# Altium footprint library FootPrintLib_11.PcbLib: 376 footprints (part 3 of 24)
Each footprint in its own frame and in the unit in brackets; x right, y up, seen from the top. Pads: shape width x height; smd on the part's side, far side on the other; paste and mask are expansions set on the pad; w line width, h text height; cw(c..) or ccw(c..) is an arc to the next point about the centre after c.
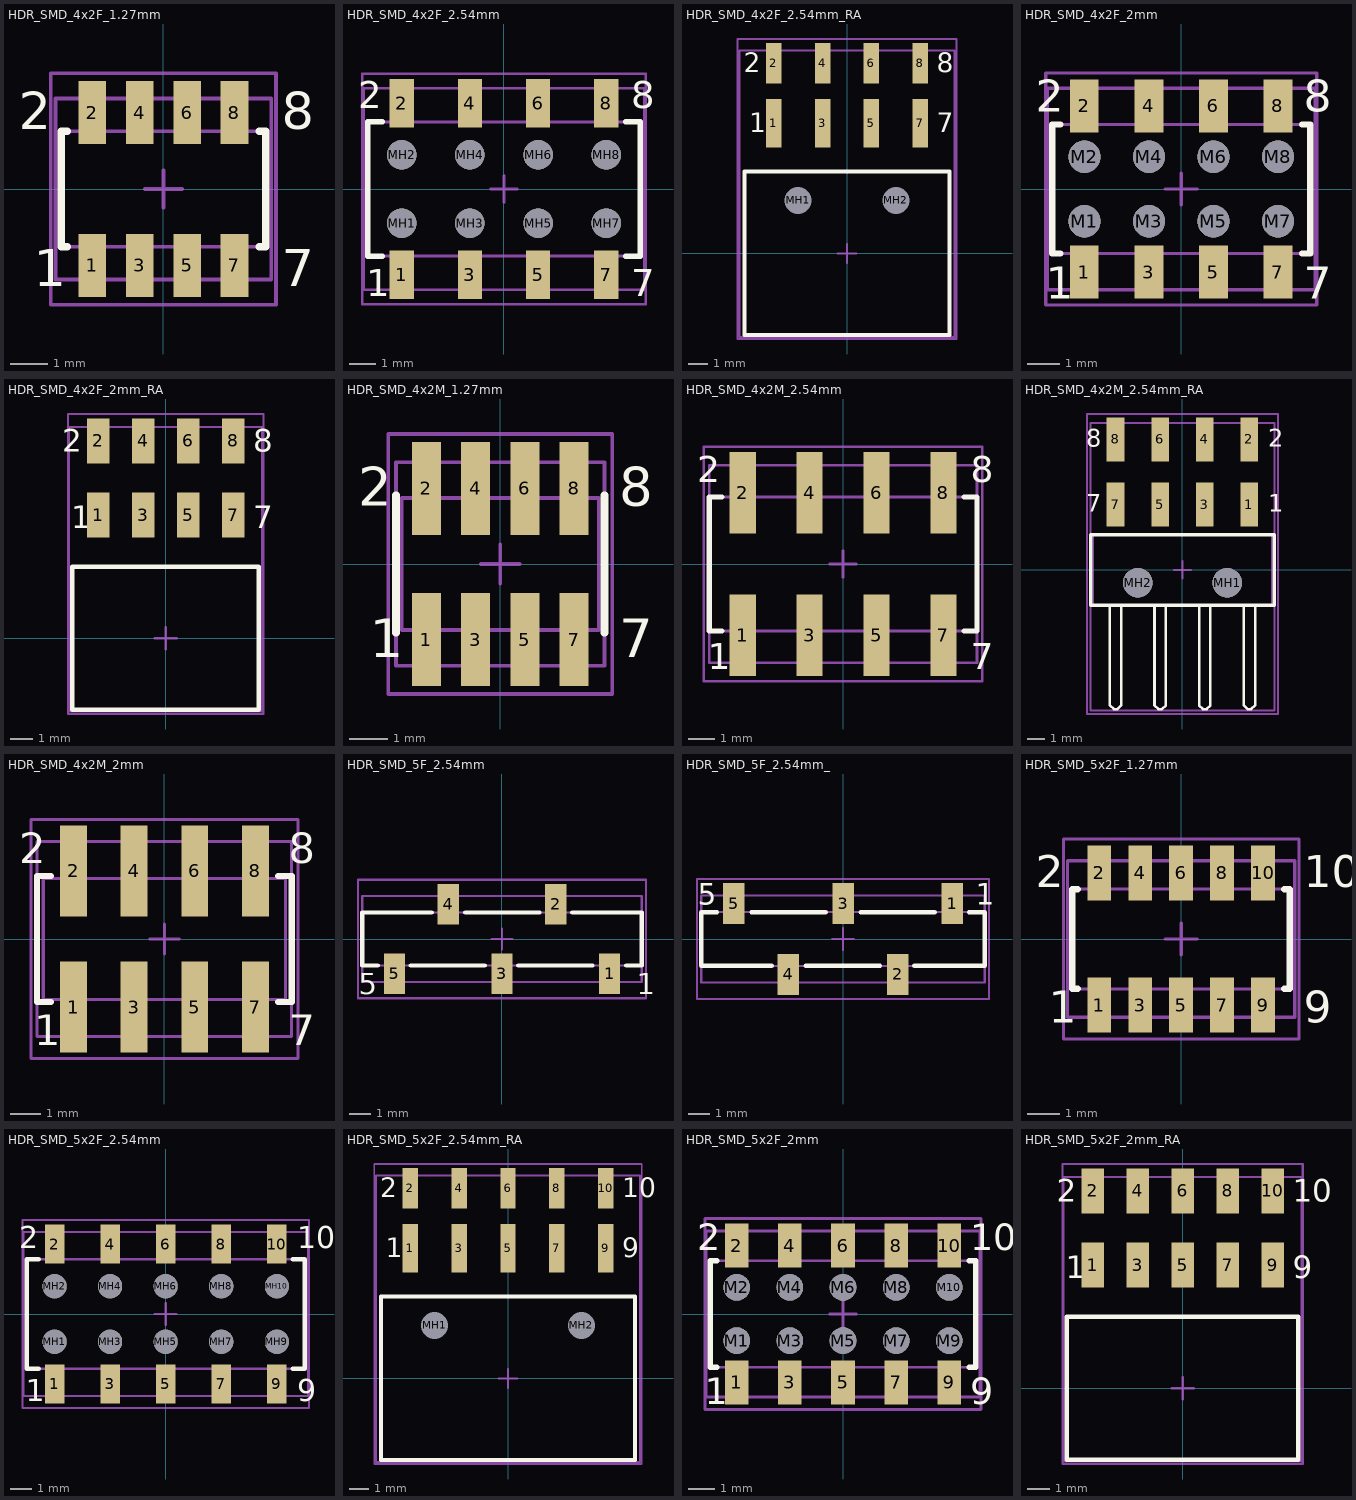
[diagram p2: the footprints below, top view; thin cyan lines are the x and y axes]

## HDR_SMD_4x2F_1.27mm [mm] "Socket Header, Pitch 1.27 mm, SMT, Vertical, dual row, 8p"
height 4.7
pads (8):
  rect 0.74x1.7 smd: 1(-1.905,-2.05) 2(-1.905,2.05) 3(-0.635,-2.05) 4(-0.635,2.05) 5(0.635,-2.05) 6(0.635,2.05) 7(1.905,-2.05) 8(1.905,2.05)
Top Overlay:
  lines w0.2: -2.57,-1.55 -2.74,-1.55 -2.74,1.55 -2.57,1.55 ; 2.57,-1.55 2.74,-1.55 2.74,1.55 2.57,1.55
  text "8" at 3.17,1.6 h1
  text "7" at 3.17,-2.6 h1
  text "2" at -3.87,1.6 h1
  text "1" at -3.47,-2.6 h1
Mechanical 11:
  lines w0.1: -2.74,-1.55 -2.74,1.55 2.74,1.55 2.74,-1.55 -2.74,-1.55
Mechanical 13:
  lines w0.1: -2.89,-2.425 2.89,-2.425 2.89,2.425 -2.89,2.425 -2.89,-2.425
Mechanical 15:
  lines w0.1: -0.5,0 0.5,0 ; 0,-0.5 0,0.5 ; -3.02,-3.1 3.02,-3.1 3.02,3.1 -3.02,3.1 -3.02,-3.1
3D body "62300821021.stp": height 4.6, standoff 0, extent -2.74,-2.299 2.74,2.299

## HDR_SMD_4x2F_2.54mm [mm] "Socket Header, Pitch 2.54 mm, SMT, Vertical, dual row, 8p"
height 3.7
pads (16):
  rect 0.9x1.8 smd: 1(-3.81,-3.2) 2(-3.81,3.2) 3(-1.27,-3.2) 4(-1.27,3.2) 5(1.27,-3.2) 6(1.27,3.2) 7(3.81,-3.2) 8(3.81,3.2)
  round 1.1 hole 1.1 unplated: MH1(-3.81,-1.27) MH2(-3.81,1.27) MH3(-1.27,-1.27) MH4(-1.27,1.27) MH5(1.27,-1.27) MH6(1.27,1.27) MH7(3.81,-1.27) MH8(3.81,1.27)
Top Overlay:
  lines w0.2: -4.54,-2.5 -5.08,-2.5 -5.08,2.5 -4.54,2.5 ; 4.54,-2.5 5.08,-2.5 5.08,2.5 4.54,2.5
  text "7" at 4.74,-4 h1
  text "8" at 4.74,3 h1
  text "2" at -5.44,3 h1
  text "1" at -5.14,-4 h1
Mechanical 11:
  lines w0.1: -5.08,-2.5 5.08,-2.5 5.08,2.5 -5.08,2.5 -5.08,-2.5
Mechanical 13:
  lines w0.1: -5.23,-3.75 5.23,-3.75 5.23,3.75 -5.23,3.75 -5.23,-3.75
Mechanical 15:
  lines w0.1: -0.5,0 0.5,0 ; 0,-0.5 0,0.5 ; -5.28,-4.3 5.28,-4.3 5.28,4.3 -5.28,4.3 -5.28,-4.3
3D body "610008243021.stp": height 3.7, standoff 0, extent -5.08,-3.603 5.08,3.603

## HDR_SMD_4x2F_2.54mm_RA [mm] "Socket Header, Pitch 2.54 mm, SMT, Angled, dual row, 8p"
height 5.2
pads (10):
  rect 0.8x2.5 smd: 1(-3.81,6.76) 3(-1.27,6.76) 5(1.27,6.76) 7(3.81,6.76)
  rect 0.8x2.1 smd: 2(-3.81,9.89) 4(-1.27,9.89) 6(1.27,9.89) 8(3.81,9.89)
  round 1.3 hole 1.4 unplated: MH1(-2.54,2.75) MH2(2.54,2.75)
Top Overlay:
  lines w0.2: -5.33,-4.25 5.33,-4.25 5.33,4.25 -5.33,4.25 -5.33,-4.25
  text "1" at -5.07,6.3 h1
  text "2" at -5.37,9.4 h1
  text "7" at 4.67,6.3 h1
  text "8" at 4.67,9.4 h1
Mechanical 11:
  lines w0.1: -5.33,-4.25 5.33,-4.25 5.33,4.25 -5.33,4.25 -5.33,-4.25
Mechanical 13:
  lines w0.1: -5.58,-4.35 5.58,-4.35 5.58,10.54 -5.58,10.54 -5.58,-4.35
Mechanical 15:
  lines w0.1: -0.5,0 0.5,0 ; 0,-0.5 0,0.5 ; -5.68,-4.45 5.68,-4.45 5.68,11.14 -5.68,11.14 -5.68,-4.45
3D body "610108249221.stp": height 5.03, standoff -1.27, extent -5.33,-4.25 5.33,10.44

## HDR_SMD_4x2F_2mm [mm] "Socket Header, Pitch 2.00 mm, SMT, Vertical, dual row, 8p"
height 2.35
pads (16):
  rect 0.89x1.65 smd: 1(-3,-2.575) 2(-3,2.575) 3(-1,-2.575) 4(-1,2.575) 5(1,-2.575) 6(1,2.575) 7(3,-2.575) 8(3,2.575)
  round 1 hole 1 unplated: M1(-3,-1) M2(-3,1) M3(-1,-1) M4(-1,1) M5(1,-1) M6(1,1) M7(3,-1) M8(3,1)
Top Overlay:
  lines w0.2: -3.75,-2 -4,-2 -4,2 -3.75,2 ; 3.75,-2 4,-2 4,2 3.75,2
  text "1" at -4.2,-3.4 h1
  text "2" at -4.5,2.4 h1
  text "7" at 3.8,-3.4 h1
  text "8" at 3.8,2.4 h1
Mechanical 11:
  lines w0.1: -4,-2 4,-2 4,2 -4,2 -4,-2
Mechanical 13:
  lines w0.1: -4.15,-3.125 4.15,-3.125 4.15,3.125 -4.15,3.125 -4.15,-3.125
Mechanical 15:
  lines w0.1: -0.5,0 0.5,0 ; 0,-0.5 0,0.5 ; -4.2,-3.6 4.2,-3.6 4.2,3.6 -4.2,3.6 -4.2,-3.6
3D body "62100821821.stp": height 2.1, standoff 0, extent -4,-3 4,3

## HDR_SMD_4x2F_2mm_RA [mm] "Socket Header, Pitch 2.00 mm, SMT, Angled, dual row, 8p"
height 4.15
pads (8):
  rect 1x2 smd: 1(-3,5.475) 2(-3,8.775) 3(-1,5.475) 4(-1,8.775) 5(1,5.475) 6(1,8.775) 7(3,5.475) 8(3,8.775)
Top Overlay:
  lines w0.2: -4.15,-3.175 -4.15,3.175 4.15,3.175 4.15,-3.175 -4.15,-3.175
  text "7" at 3.9,4.9 h1
  text "8" at 3.9,8.3 h1
  text "1" at -4.2,4.9 h1
  text "2" at -4.6,8.3 h1
Mechanical 11:
  lines w0.1: -4.15,-3.175 4.15,-3.175 4.15,3.175 -4.15,3.175 -4.15,-3.175
Mechanical 13:
  lines w0.1: -4.3,-3.25 -4.3,9.4 4.3,9.4 4.3,-3.25 -4.3,-3.25
Mechanical 15:
  lines w0.1: -0.5,0 0.5,0 ; 0,-0.5 0,0.5 ; -4.35,-3.375 4.35,-3.375 4.35,9.975 -4.35,9.975 -4.35,-3.375
3D body "621108284621.stp": height 4.05, standoff 0.05, extent -4.15,-3.175 4.15,9.275

## HDR_SMD_4x2M_1.27mm [mm] "Pin Header, pitch 1.27 mm, SMD, Vertical, dual row, 8p"
height 6.55
pads (8):
  rect 0.75x2.4 smd: 1(-1.905,-1.95) 2(-1.905,1.95) 3(-0.635,-1.95) 4(-0.635,1.95) 5(0.635,-1.95) 6(0.635,1.95) 7(1.905,-1.95) 8(1.905,1.95)
Top Overlay:
  lines w0.2: -2.69,-1.775 -2.69,1.775 ; 2.69,-1.775 2.69,1.775
  text "8" at 3.07,1.5 h1
  text "7" at 3.07,-2.4 h1
  text "2" at -3.67,1.5 h1
  text "1" at -3.37,-2.4 h1
Mechanical 11:
  lines w0.1: -2.54,-1.7 2.54,-1.7 2.54,1.7 -2.54,1.7 -2.54,-1.7
Mechanical 13:
  lines w0.1: -2.69,-2.625 -2.69,2.625 2.69,2.625 2.69,-2.625 -2.69,-2.625
Mechanical 15:
  lines w0.1: -0.5,0 0.5,0 ; 0,-0.5 0,0.5 ; -2.89,-3.35 2.89,-3.35 2.89,3.35 -2.89,3.35 -2.89,-3.35
3D body "62100821021.stp": height 5.9, standoff -0.01, extent -2.54,-2.5 2.54,2.5

## HDR_SMD_4x2M_2.54mm [mm] "Pin Header, pitch 2.54 mm, SMD, Vertical, dual row, 8p"
height 9.6
pads (8):
  rect 1x3.1 smd: 1(-3.81,-2.7) 2(-3.81,2.7) 3(-1.27,-2.7) 4(-1.27,2.7) 5(1.27,-2.7) 6(1.27,2.7) 7(3.81,-2.7) 8(3.81,2.7)
Top Overlay:
  lines w0.2: -4.59,-2.54 -5.08,-2.54 -5.08,2.54 -4.59,2.54 ; 4.59,-2.54 5.08,-2.54 5.08,2.54 4.59,2.54
  text "8" at 4.84,3.1 h1
  text "7" at 4.84,-4 h1
  text "1" at -5.14,-4 h1
  text "2" at -5.54,3.1 h1
Mechanical 11:
  lines w0.1: -5.08,-2.54 5.08,-2.54 5.08,2.54 -5.08,2.54 -5.08,-2.54
Mechanical 13:
  lines w0.1: -5.08,-3.75 -5.08,3.75 5.08,3.75 5.08,-3.75 -5.08,-3.75
Mechanical 15:
  lines w0.1: -0.5,0 0.5,0 ; 0,-0.5 0,0.5 ; -5.28,-4.45 -5.28,4.45 5.28,4.45 5.28,-4.45 -5.28,-4.45
3D body "61000821121.stp": height 9.62, standoff 0.02, extent -5.08,-3.75 5.08,3.75

## HDR_SMD_4x2M_2.54mm_RA [mm] "Pin Header, pitch 2.54 mm, SMD, Angled, dual row, 8p"
height 5.08
pads (10):
  rect 1x2.5 smd: 1(3.81,3.72) 2(3.81,7.42) 3(1.27,3.72) 4(1.27,7.42) 5(-1.27,3.72) 6(-1.27,7.42) 7(-3.81,3.72) 8(-3.81,7.42)
  round 1.68 hole 1.68 unplated: MH1(2.54,-0.73) MH2(-2.54,-0.73)
Top Overlay:
  lines w0.15: -4.13,-2 -4.13,-7.3 -4.13,-7.58 -4.13,-7.705 -3.91,-7.925 -3.71,-7.925 -3.49,-7.705 -3.49,-7.58 -3.49,-7.3 -3.49,-2 ; -1.59,-2 -1.59,-7.3 -1.59,-7.58 -1.59,-7.705 -1.37,-7.925 -1.17,-7.925 -0.95,-7.705 -0.95,-7.58 -0.95,-7.3 -0.95,-2 ; 0.95,-2 0.95,-7.3 0.95,-7.58 0.95,-7.705 1.17,-7.925 1.37,-7.925 1.59,-7.705 1.59,-7.58 1.59,-7.3 1.59,-2 ; 3.49,-2 3.49,-7.3 3.49,-7.58 3.49,-7.705 3.71,-7.925 3.91,-7.925 4.13,-7.705 4.13,-7.58 4.13,-7.3 4.13,-2
  lines w0.2: -5.23,-2 -5.23,2 5.23,2 5.23,-2 -5.23,-2
  text "7" at -5.47,3.3 h1
  text "8" at -5.47,7 h1
  text "2" at 4.87,7 h1
  text "1" at 4.87,3.3 h1
Mechanical 11:
  lines w0.1: -5.08,-2 -5.08,2 5.08,2 5.08,-2 -5.08,-2
Mechanical 13:
  lines w0.1: -5.23,-8 -5.23,8.36 5.23,8.36 5.23,-8 -5.23,-8
Mechanical 15:
  lines w0.1: -0.5,0 0.5,0 ; 0,-0.5 0,0.5 ; -5.43,-8.2 5.43,-8.2 5.43,8.87 -5.43,8.87 -5.43,-8.2
3D body "610108249121.stp": height 5.1, standoff -1.38, extent -5.08,-8 5.08,8.16

## HDR_SMD_4x2M_2mm [mm] "Pin Header, pitch 2.00 mm, SMD, Vertical, dual row, 8p"
height 6.8
pads (8):
  rect 0.89x3 smd: 1(-3,-2.25) 2(-3,2.25) 3(-1,-2.25) 4(-1,2.25) 5(1,-2.25) 6(1,2.25) 7(3,-2.25) 8(3,2.25)
Top Overlay:
  lines w0.2: -3.75,-2.075 -4.2,-2.075 -4.2,2.075 -3.75,2.075 ; 3.75,-2.075 4.2,-2.075 4.2,2.075 3.75,2.075
  text "7" at 4.1,-3.5 h1
  text "8" at 4.1,2.5 h1
  text "2" at -4.8,2.5 h1
  text "1" at -4.3,-3.5 h1
Mechanical 11:
  lines w0.1: -4,-2 -4,2 4,2 4,-2 -4,-2
Mechanical 13:
  lines w0.1: -4.2,-3.225 4.2,-3.225 4.2,3.225 -4.2,3.225 -4.2,-3.225
Mechanical 15:
  lines w0.1: -0.5,0 0.5,0 ; 0,-0.5 0,0.5 ; -4.4,-3.95 4.4,-3.95 4.4,3.95 -4.4,3.95 -4.4,-3.95
3D body "62100821921.stp": height 6.7, standoff 0, extent -4,-3.1 4,3.1

## HDR_SMD_5F_2.54mm [mm] "Socket Header, Pitch 2.54 mm, SMT, Vertical, single row, 5p"
height 7.5
pads (5):
  rect 1x1.91 smd: 1(5.08,-1.645) 2(2.54,1.645) 3(0,-1.645) 4(-2.54,1.645) 5(-5.08,-1.645)
Top Overlay:
  lines w0.2: -5.87,-1.25 -6.6,-1.25 -6.6,1.25 -3.32,1.25 ; -4.31,-1.25 -0.81,-1.25 ; -1.73,1.25 1.77,1.25 ; 0.77,-1.25 4.27,-1.25 ; 3.32,1.25 6.6,1.25 6.6,-1.25 5.87,-1.25
  text "5" at -6.77,-2.6 h1
  text "1" at 6.37,-2.6 h1
Mechanical 11:
  lines w0.1: -6.6,-1.25 -6.6,1.25 6.6,1.25 6.6,-1.25 -6.6,-1.25
Mechanical 13:
  lines w0.1: -6.6,-2.025 -6.6,2.025 6.6,2.025 6.6,-2.025 -6.6,-2.025
Mechanical 15:
  lines w0.1: -0.5,0 0.5,0 ; 0,-0.5 0,0.5 ; -6.8,-2.8 -6.8,2.8 6.8,2.8 6.8,-2.8 -6.8,-2.8
3D body "61000511921.stp": height 7.5, standoff 0, extent -6.6,-2.025 6.6,2.025

## HDR_SMD_5F_2.54mm_ [mm] "Socket Header, Pitch 2.54 mm, SMT, Vertical, single row, 5p"
height 7.5
pads (5):
  rect 1x1.91 smd: 1(5.08,1.645) 2(2.54,-1.645) 3(0,1.645) 4(-2.54,-1.645) 5(-5.08,1.645)
Top Overlay:
  lines w0.2: -5.87,1.25 -6.6,1.25 -6.6,-1.25 -3.32,-1.25 ; -4.26,1.25 -0.81,1.25 ; -1.73,-1.25 1.72,-1.25 ; 0.82,1.25 4.27,1.25 ; 3.32,-1.25 6.6,-1.25 6.6,1.25 5.87,1.25
  text "5" at -6.77,1.6 h1
  text "1" at 6.17,1.6 h1
Mechanical 11:
  lines w0.1: -6.6,-1.25 -6.6,1.25 6.6,1.25 6.6,-1.25 -6.6,-1.25
Mechanical 13:
  lines w0.1: -6.6,-2.025 6.6,-2.025 6.6,2.025 -6.6,2.025 -6.6,-2.025
Mechanical 15:
  lines w0.1: -0.5,0 0.5,0 ; 0,-0.5 0,0.5 ; -6.8,-2.8 6.8,-2.8 6.8,2.8 -6.8,2.8 -6.8,-2.8
3D body "61000513321.stp": height 7.5, standoff 0, extent -6.6,-2.025 6.6,2.025

## HDR_SMD_5x2F_1.27mm [mm] "Socket Header, Pitch 1.27 mm, SMT, Vertical, dual row, 10p"
height 4.7
pads (10):
  rect 0.74x1.7 smd: 1(-2.54,-2.05) 2(-2.54,2.05) 3(-1.27,-2.05) 4(-1.27,2.05) 5(0,-2.05) 6(0,2.05) 7(1.27,-2.05) 8(1.27,2.05) 9(2.54,-2.05) 10(2.54,2.05)
Top Overlay:
  lines w0.2: -3.205,-1.55 -3.375,-1.55 -3.375,1.55 -3.205,1.55 ; 3.205,-1.55 3.375,-1.55 3.375,1.55 3.205,1.55
  text "1" at -4.105,-2.6 h1
  text "2" at -4.505,1.6 h1
  text "9" at 3.805,-2.6 h1
  text "10" at 3.805,1.6 h1
Mechanical 11:
  lines w0.1: -3.375,-1.55 3.375,-1.55 3.375,1.55 -3.375,1.55 -3.375,-1.55
Mechanical 13:
  lines w0.1: -3.525,-2.425 -3.525,2.425 3.525,2.425 3.525,-2.425 -3.525,-2.425
Mechanical 15:
  lines w0.1: -0.5,0 0.5,0 ; 0,-0.5 0,0.5 ; -3.655,-3.1 -3.655,3.1 3.655,3.1 3.655,-3.1 -3.655,-3.1
3D body "62301021021.stp": height 4.6, standoff 0, extent -3.375,-2.299 3.375,2.299

## HDR_SMD_5x2F_2.54mm [mm] "Socket Header, Pitch 2.54 mm, SMT, Vertical, dual row, 10p"
height 3.7
pads (20):
  rect 0.9x1.8 smd: 1(-5.08,-3.2) 2(-5.08,3.2) 3(-2.54,-3.2) 4(-2.54,3.2) 5(0,-3.2) 6(0,3.2) 7(2.54,-3.2) 8(2.54,3.2) 9(5.08,-3.2) 10(5.08,3.2)
  round 1.1 hole 1.1 unplated: MH1(-5.08,-1.27) MH2(-5.08,1.27) MH3(-2.54,-1.27) MH4(-2.54,1.27) MH5(0,-1.27) MH6(0,1.27) MH7(2.54,-1.27) MH8(2.54,1.27) MH9(5.08,-1.27) MH10(5.08,1.27)
Top Overlay:
  lines w0.2: -5.81,-2.5 -6.35,-2.5 -6.35,2.5 -5.81,2.5 ; 5.81,-2.5 6.35,-2.5 6.35,2.5 5.81,2.5
  text "9" at 6.01,-4 h1
  text "10" at 6.01,3 h1
  text "2" at -6.71,3 h1
  text "1" at -6.41,-4 h1
Mechanical 11:
  lines w0.1: -6.35,-2.5 6.35,-2.5 6.35,2.5 -6.35,2.5 -6.35,-2.5
Mechanical 13:
  lines w0.1: -6.5,-3.75 6.5,-3.75 6.5,3.75 -6.5,3.75 -6.5,-3.75
Mechanical 15:
  lines w0.1: -0.5,0 0.5,0 ; 0,-0.5 0,0.5 ; -6.55,-4.3 6.55,-4.3 6.55,4.3 -6.55,4.3 -6.55,-4.3
3D body "610010243021.stp": height 3.7, standoff 0, extent -6.35,-3.603 6.35,3.603

## HDR_SMD_5x2F_2.54mm_RA [mm] "Socket Header, Pitch 2.54 mm, SMT, Angled, dual row, 10p"
height 5.2
pads (12):
  rect 0.8x2.5 smd: 1(-5.08,6.76) 3(-2.54,6.76) 5(0,6.76) 7(2.54,6.76) 9(5.08,6.76)
  rect 0.8x2.1 smd: 2(-5.08,9.89) 4(-2.54,9.89) 6(0,9.89) 8(2.54,9.89) 10(5.08,9.89)
  round 1.3 hole 1.4 unplated: MH1(-3.81,2.75) MH2(3.81,2.75)
Top Overlay:
  lines w0.2: -6.6,-4.25 -6.6,4.25 6.6,4.25 6.6,-4.25 -6.6,-4.25
  text "10" at 5.94,9.4 h1
  text "9" at 5.94,6.3 h1
  text "2" at -6.64,9.4 h1
  text "1" at -6.34,6.3 h1
Mechanical 11:
  lines w0.1: -6.6,-4.25 -6.6,4.25 6.6,4.25 6.6,-4.25 -6.6,-4.25
Mechanical 13:
  lines w0.1: -6.85,-4.35 -6.85,10.54 6.85,10.54 6.85,-4.35 -6.85,-4.35
Mechanical 15:
  lines w0.1: -0.5,0 0.5,0 ; 0,-0.5 0,0.5 ; -6.95,-4.45 -6.95,11.14 6.95,11.14 6.95,-4.45 -6.95,-4.45
3D body "610110249221.stp": height 5.03, standoff -1.27, extent -6.6,-4.25 6.6,10.44

## HDR_SMD_5x2F_2mm [mm] "Socket Header, Pitch 2.00 mm, SMT, Vertical, dual row, 10p"
height 2.35
pads (20):
  rect 0.89x1.65 smd: 1(-4,-2.575) 2(-4,2.575) 3(-2,-2.575) 4(-2,2.575) 5(0,-2.575) 6(0,2.575) 7(2,-2.575) 8(2,2.575) 9(4,-2.575) 10(4,2.575)
  round 1 hole 1 unplated: M1(-4,-1) M2(-4,1) M3(-2,-1) M4(-2,1) M5(0,-1) M6(0,1) M7(2,-1) M8(2,1) M9(4,-1) M10(4,1)
Top Overlay:
  lines w0.2: -4.75,-2 -5,-2 -5,2 -4.75,2 ; 4.75,-2 5,-2 5,2 4.75,2
  text "10" at 4.8,2.4 h1
  text "9" at 4.8,-3.4 h1
  text "2" at -5.5,2.4 h1
  text "1" at -5.2,-3.4 h1
Mechanical 11:
  lines w0.1: -5,-2 -5,2 5,2 5,-2 -5,-2
Mechanical 13:
  lines w0.1: -5.15,-3.125 -5.15,3.125 5.15,3.125 5.15,-3.125 -5.15,-3.125
Mechanical 15:
  lines w0.1: -0.5,0 0.5,0 ; 0,-0.5 0,0.5 ; -5.2,-3.6 -5.2,3.6 5.2,3.6 5.2,-3.6 -5.2,-3.6
3D body "62101021821.stp": height 2.1, standoff 0, extent -5,-3 5,3

## HDR_SMD_5x2F_2mm_RA [mm] "Socket Header, Pitch 2.00 mm, SMT, Angled, dual row, 10p"
height 4.15
pads (10):
  rect 1x2 smd: 1(-4,5.475) 2(-4,8.775) 3(-2,5.475) 4(-2,8.775) 5(0,5.475) 6(0,8.775) 7(2,5.475) 8(2,8.775) 9(4,5.475) 10(4,8.775)
Top Overlay:
  lines w0.2: -5.15,-3.175 5.15,-3.175 5.15,3.175 -5.15,3.175 -5.15,-3.175
  text "9" at 4.9,4.9 h1
  text "10" at 4.9,8.3 h1
  text "2" at -5.6,8.3 h1
  text "1" at -5.2,4.9 h1
Mechanical 11:
  lines w0.1: -5.15,-3.175 -5.15,3.175 5.15,3.175 5.15,-3.175 -5.15,-3.175
Mechanical 13:
  lines w0.1: -5.3,-3.25 5.3,-3.25 5.3,9.4 -5.3,9.4 -5.3,-3.25
Mechanical 15:
  lines w0.1: -0.5,0 0.5,0 ; 0,-0.5 0,0.5 ; -5.35,-3.375 -5.35,9.975 5.35,9.975 5.35,-3.375 -5.35,-3.375
3D body "621110284621.stp": height 4.05, standoff 0.05, extent -5.15,-3.175 5.15,9.275